# Altium footprint library Miscellaneous Devices.PcbLib: 306 footprints (part 13 of 20)
Each footprint in its own frame and in the unit in brackets; x right, y up, seen from the top. Pads: shape width x height; smd on the part's side, far side on the other; paste and mask are expansions set on the pad; w line width, h text height; cw(c..) or ccw(c..) is an arc to the next point about the centre after c.
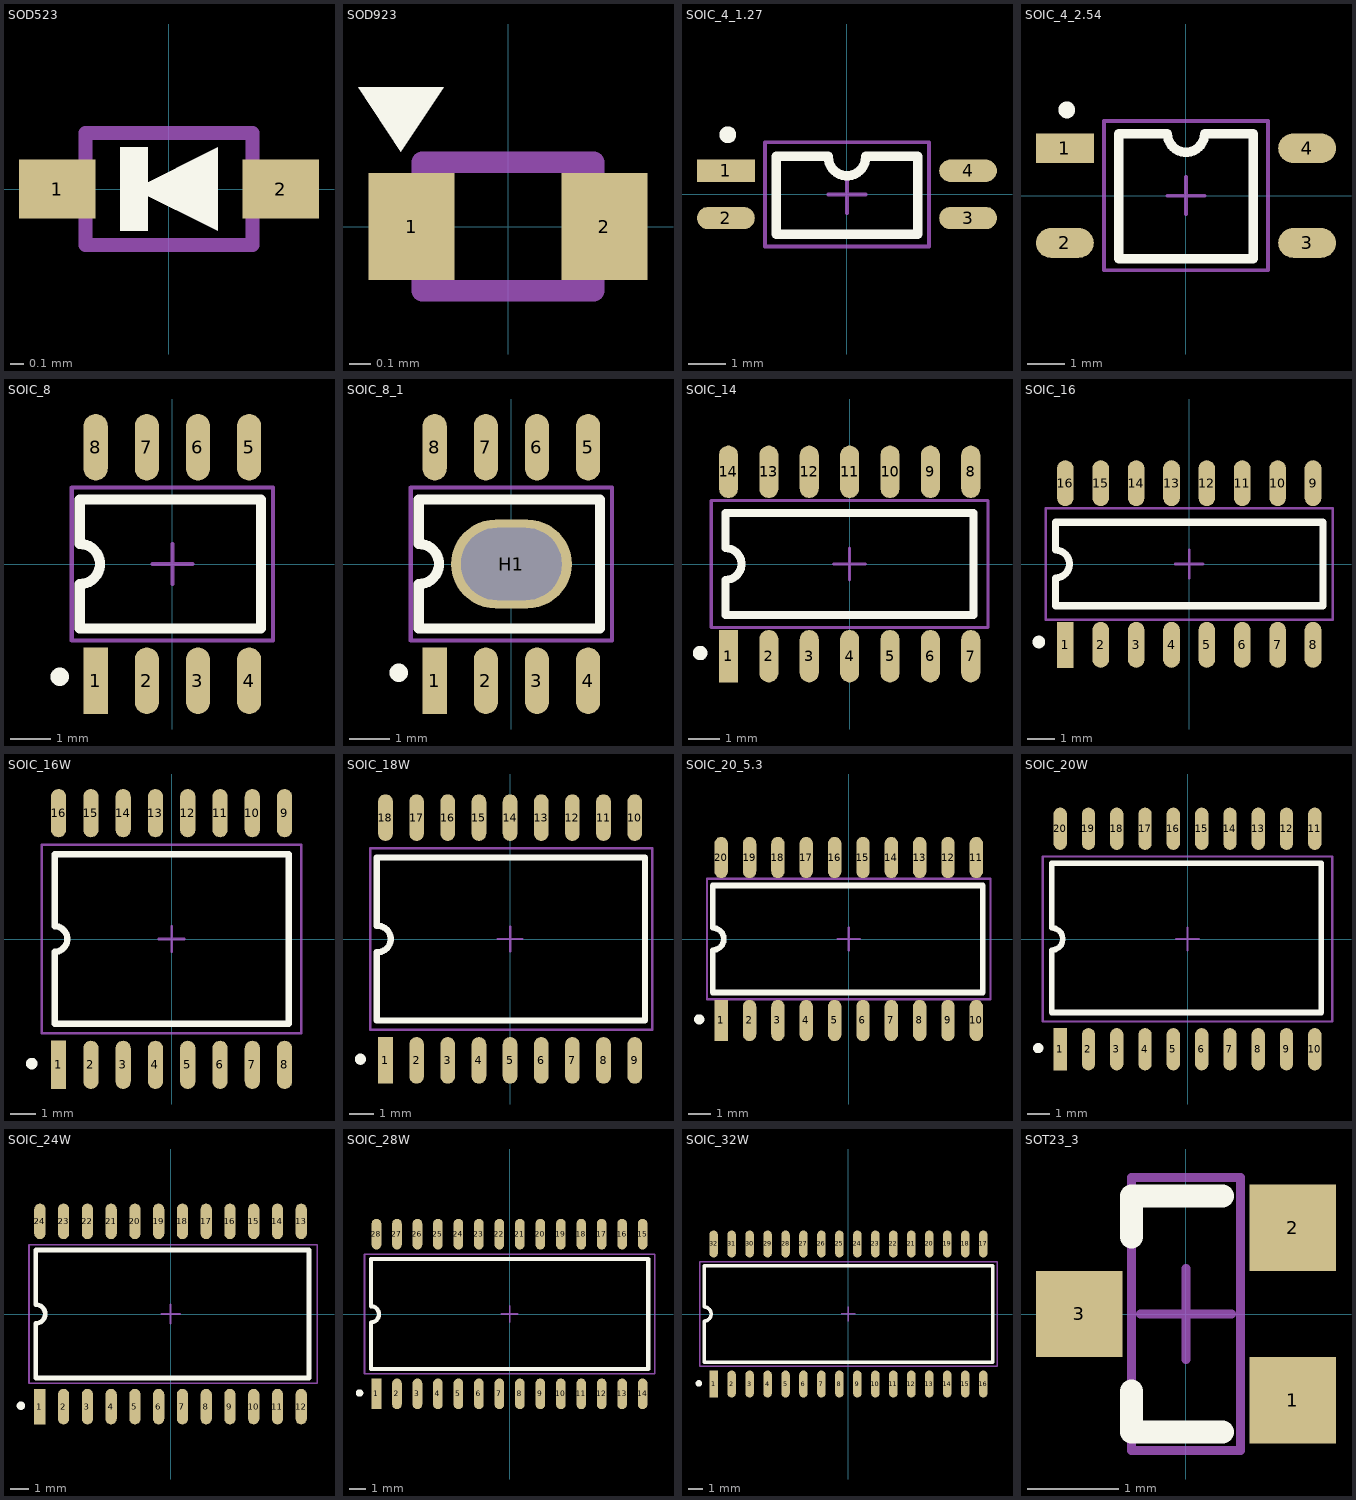
[diagram p12: the footprints below, top view; thin cyan lines are the x and y axes]

## SOD523 [mm]
pads (2):
  rect 0.55x0.42 smd: 1(-0.8,0) 2(0.8,0)
Top Overlay:
  rectangle: -0.35,-0.3 -0.15,0.3
  region: -0.25,0 0.35,-0.3 0.35,0.3
Mechanical 15:
  lines w0.1: -0.6,-0.4 0.6,-0.4 0.6,0.4 -0.6,0.4 -0.6,-0.4
3D body: height 0.7, standoff 0, extent -0.8,-0.4 0.8,0.398

## SOD923 [mm]
pads (2):
  rect 0.4x0.5 smd: 1(-0.45,0) 2(0.45,0)
Top Overlay:
  region: -0.7,0.65 -0.3,0.65 -0.5,0.35
Mechanical 15:
  lines w0.1: -0.4,-0.3 -0.4,0.3 0.4,0.3 0.4,-0.3 -0.4,-0.3
3D body: height 0.4, standoff 0, extent -0.5,-0.3 0.5,0.3

## SOIC_4_1.27 [mm]
pads (4):
  rect 1.55x0.6 smd: 1(-3.25,0.635)
  oval 1.55x0.6 smd: 2(-3.25,-0.635) 3(3.25,-0.635) 4(3.25,0.635)
Top Overlay:
  circle w0.254: c-3.2,1.6 r0.1
  lines w0.254: -0.5,1 ccw(c0,1) 0.5,1 ; -0.5,1.03 -1.9,1.03 -1.9,-1.065 1.9,-1.065 1.9,1.03 0.5,1.03
Mechanical 15:
  lines w0.1: -0.5,0 0.5,0 ; 0,-0.5 0,0.5 ; -2.2,-1.4 2.2,-1.4 2.2,1.4 -2.2,1.4 -2.2,-1.4
3D body: height 2.1, standoff 0, extent -3.5,-1.4 3.5,1.4

## SOIC_4_2.54 [mm]
pads (4):
  rect 1.55x0.8 smd: 1(-3.25,1.27)
  oval 1.55x0.8 smd: 2(-3.25,-1.27) 3(3.25,-1.27) 4(3.25,1.27)
Top Overlay:
  circle w0.254: c-3.2,2.3 r0.1
  lines w0.254: -1.8,-1.7 1.8,-1.7 1.8,1.665 0.5,1.665 cw(c0,1.665) -0.5,1.665 -1.8,1.665 -1.8,-1.7
Mechanical 15:
  lines w0.1: -0.5,0 0.5,0 ; 0,-0.5 0,0.5 ; -2.2,-2 2.2,-2 2.2,2 -2.2,2 -2.2,-2
3D body: height 2.02, standoff -0.02, extent -3.43,-2 3.43,2

## SOIC_8 [mm]
pads (8):
  rect 0.6x1.65 smd: 1(-1.905,-2.9)
  oval 0.6x1.65 smd: 2(-0.635,-2.9) 3(0.635,-2.9) 4(1.905,-2.9) 5(1.905,2.9) 6(0.635,2.9) 7(-0.635,2.9) 8(-1.905,2.9)
Top Overlay:
  circle w0.254: c-2.8,-2.8 r0.1
  lines w0.254: -2.3,-1.6 -2.3,-0.5 ccw(c-2.3,0) -2.3,0.5 -2.3,1.6 2.2,1.6 2.2,-1.6 -2.3,-1.6
Mechanical 15:
  lines w0.1: -0.5,0 0.5,0 ; 0,-0.5 0,0.5 ; -2.5,-1.9 -2.5,1.9 2.5,1.9 2.5,-1.9 -2.5,-1.9
3D body: height 1.75, standoff 0, extent -2.5,-3.006 2.5,3.006

## SOIC_8_1 [mm]
pads (9):
  rect 0.6x1.65 smd: 1(-1.905,-2.9)
  oval 0.6x1.65 smd: 2(-0.635,-2.9) 3(0.635,-2.9) 4(1.905,-2.9) 5(1.905,2.9) 6(0.635,2.9) 7(-0.635,2.9) 8(-1.905,2.9)
  oval 3x2.2 hole 1.8 slot 2.5 at 0 deg: H1(0,0)
Top Overlay:
  circle w0.254: c-2.8,-2.7 r0.1
  lines w0.254: -2.3,-1.6 2.2,-1.6 2.2,1.6 -2.3,1.6 -2.3,0.5 cw(c-2.3,0) -2.3,-0.5 -2.3,-1.6
Mechanical 15:
  lines w0.1: -2.5,-1.9 -2.5,1.9 2.5,1.9 2.5,-1.9 -2.5,-1.9
3D body: height 1.75, standoff 0, extent -2.5,-3.006 2.5,3.006

## SOIC_14 [mm]
pads (14):
  rect 0.6x1.65 smd: 1(-3.81,-2.9)
  oval 0.6x1.65 smd: 2(-2.54,-2.9) 3(-1.27,-2.9) 4(0,-2.9) 5(1.27,-2.9) 6(2.54,-2.9) 7(3.81,-2.9) 8(3.81,2.9) 9(2.54,2.9) 10(1.27,2.9) 11(0,2.9) 12(-1.27,2.9) 13(-2.54,2.9) 14(-3.81,2.9)
Top Overlay:
  circle w0.254: c-4.7,-2.8 r0.1
  lines w0.254: -3.9,-1.6 3.9,-1.6 3.9,1.6 -3.9,1.6 -3.9,0.5 cw(c-3.9,0) -3.9,-0.5 -3.9,-1.6
Mechanical 15:
  lines w0.1: -0.5,0 0.5,0 ; 0,-0.5 0,0.5 ; -4.35,-2 4.35,-2 4.35,2 -4.35,2 -4.35,-2
3D body: height 1.95, standoff 0, extent -4.35,-3.03 4.35,3.026

## SOIC_16 [mm]
pads (16):
  rect 0.6x1.65 smd: 1(-4.445,-2.9)
  oval 0.6x1.65 smd: 2(-3.175,-2.9) 3(-1.905,-2.9) 4(-0.635,-2.9) 5(0.635,-2.9) 6(1.905,-2.9) 7(3.175,-2.9) 8(4.445,-2.9) 9(4.445,2.9) 10(3.175,2.9) 11(1.905,2.9) 12(0.635,2.9) 13(-0.635,2.9) 14(-1.905,2.9) 15(-3.175,2.9) 16(-4.445,2.9)
Top Overlay:
  circle w0.254: c-5.4,-2.8 r0.1
  lines w0.254: -4.8,-1.5 4.8,-1.5 4.8,1.5 -4.8,1.5 -4.8,0.5 cw(c-4.8,0) -4.8,-0.5 -4.8,-1.5
Mechanical 15:
  lines w0.1: -0.5,0 0.5,0 ; 0,-0.5 0,0.5 ; -5.15,-2 -5.15,2 5.15,2 5.15,-2 -5.15,-2
3D body: height 1.95, standoff 0, extent -5.15,-3.03 5.15,3.026

## SOIC_16W [mm] "7.4"
pads (16):
  rect 0.6x1.9 smd: 1(-4.445,-4.95)
  oval 0.6x1.9 smd: 2(-3.175,-4.95) 3(-1.905,-4.95) 4(-0.635,-4.95) 5(0.635,-4.95) 6(1.905,-4.95) 7(3.175,-4.95) 8(4.445,-4.95) 9(4.445,4.95) 10(3.175,4.95) 11(1.905,4.95) 12(0.635,4.95) 13(-0.635,4.95) 14(-1.905,4.95) 15(-3.175,4.95) 16(-4.445,4.95)
Top Overlay:
  circle w0.254: c-5.5,-4.9 r0.1
  lines w0.254: -4.6,-3.325 -4.6,-0.5 ccw(c-4.6,0) -4.6,0.5 -4.6,3.325 4.6,3.325 4.6,-3.325 -4.6,-3.325
Mechanical 15:
  lines w0.1: -0.5,0 0.5,0 ; 0,-0.5 0,0.5 ; -5.1,-3.7 5.1,-3.7 5.1,3.7 -5.1,3.7 -5.1,-3.7
3D body: height 3.5, standoff 0, extent -5.1,-5.15 5.1,5.15

## SOIC_18W [mm] "7.4"
pads (18):
  rect 0.6x1.9 smd: 1(-5.08,-4.95)
  oval 0.6x1.9 smd: 2(-3.81,-4.95) 3(-2.54,-4.95) 4(-1.27,-4.95) 5(0,-4.95) 6(1.27,-4.95) 7(2.54,-4.95) 8(3.81,-4.95) 9(5.08,-4.95) 10(5.08,4.95) 11(3.81,4.95) 12(2.54,4.95) 13(1.27,4.95) 14(0,4.95) 15(-1.27,4.95) 16(-2.54,4.95) 17(-3.81,4.95) 18(-5.08,4.95)
Top Overlay:
  circle w0.254: c-6.1,-4.9 r0.1
  lines w0.254: -5.435,-3.325 5.5,-3.325 5.5,3.325 -5.435,3.325 -5.435,0.535 cw(c-5.4,0) -5.435,-0.535 -5.435,-3.325
Mechanical 15:
  lines w0.1: -0.5,0 0.5,0 ; 0,-0.5 0,0.5 ; -5.7,-3.7 -5.7,3.7 5.8,3.7 5.8,-3.7 -5.7,-3.7
3D body: height 2.65, standoff 0, extent -5.73,-5.15 5.8,5.15

## SOIC_20_5.3 [mm]
pads (20):
  rect 0.6x1.85 smd: 1(-5.715,-3.65)
  oval 0.6x1.85 smd: 2(-4.445,-3.65) 3(-3.175,-3.65) 4(-1.905,-3.65) 5(-0.635,-3.65) 6(0.635,-3.65) 7(1.905,-3.65) 8(3.175,-3.65) 9(4.445,-3.65) 10(5.715,-3.65) 11(5.715,3.65) 12(4.445,3.65) 13(3.175,3.65) 14(1.905,3.65) 15(0.635,3.65) 16(-0.635,3.65) 17(-1.905,3.65) 18(-3.175,3.65) 19(-4.445,3.65) 20(-5.715,3.65)
Top Overlay:
  circle w0.254: c-6.7,-3.6 r0.1
  lines w0.254: -6.1,-2.4 6,-2.4 6,2.4 -6.1,2.4 -6.1,0.5 cw(c-6.1,0) -6.1,-0.5 -6.1,-2.4
Mechanical 15:
  lines w0.1: -0.5,0 0.5,0 ; 0,-0.5 0,0.5 ; -6.35,-2.7 -6.35,2.7 6.35,2.7 6.35,-2.7 -6.35,-2.7
3D body: height 2, standoff 0, extent -6.35,-4.05 6.35,4.05

## SOIC_20W [mm] "7.4"
pads (20):
  rect 0.6x1.9 smd: 1(-5.715,-4.95)
  oval 0.6x1.9 smd: 2(-4.445,-4.95) 3(-3.175,-4.95) 4(-1.905,-4.95) 5(-0.635,-4.95) 6(0.635,-4.95) 7(1.905,-4.95) 8(3.175,-4.95) 9(4.445,-4.95) 10(5.715,-4.95) 11(5.715,4.95) 12(4.445,4.95) 13(3.175,4.95) 14(1.905,4.95) 15(0.635,4.95) 16(-0.635,4.95) 17(-1.905,4.95) 18(-3.175,4.95) 19(-4.445,4.95) 20(-5.715,4.95)
Top Overlay:
  circle w0.254: c-6.7,-4.9 r0.1
  lines w0.254: -6.1,-3.3 6,-3.3 6,3.4 -6.1,3.4 -6.1,0.5 cw(c-6.1,0) -6.1,-0.5 -6.1,-3.3
Mechanical 15:
  lines w0.1: -0.5,0 0.5,0 ; 0,-0.5 0,0.5 ; -6.5,-3.7 -6.5,3.7 6.5,3.7 6.5,-3.7 -6.5,-3.7
3D body: height 2.8, standoff 0, extent -6.518,-5.152 6.482,5.184

## SOIC_24W [mm] "7.4"
pads (24):
  rect 0.6x1.9 smd: 1(-6.985,-4.95)
  oval 0.6x1.9 smd: 2(-5.715,-4.95) 3(-4.445,-4.95) 4(-3.175,-4.95) 5(-1.905,-4.95) 6(-0.635,-4.95) 7(0.635,-4.95) 8(1.905,-4.95) 9(3.175,-4.95) 10(4.445,-4.95) 11(5.715,-4.95) 12(6.985,-4.95) 13(6.985,4.95) 14(5.715,4.95) 15(4.445,4.95) 16(3.175,4.95) 17(1.905,4.95) 18(0.635,4.95) 19(-0.635,4.95) 20(-1.905,4.95) 21(-3.175,4.95) 22(-4.445,4.95) 23(-5.715,4.95) 24(-6.985,4.95)
Top Overlay:
  circle w0.254: c-8,-4.9 r0.1
  lines w0.254: -7.2,-3.425 -7.2,-0.5 ccw(c-7.2,0) -7.2,0.5 -7.2,3.425 7.4,3.425 7.4,-3.425 -7.2,-3.425
Mechanical 15:
  lines w0.1: -0.5,0 0.5,0 ; 0,-0.5 0,0.5 ; -7.56,-3.7 -7.56,3.7 7.84,3.7 7.84,-3.7 -7.56,-3.7
3D body: height 2.6, standoff 0, extent -7.56,-5.2 7.84,5.2

## SOIC_28W [mm] "7.4"
pads (28):
  rect 0.6x1.9 smd: 1(-8.255,-4.95)
  oval 0.6x1.9 smd: 2(-6.985,-4.95) 3(-5.715,-4.95) 4(-4.445,-4.95) 5(-3.175,-4.95) 6(-1.905,-4.95) 7(-0.635,-4.95) 8(0.635,-4.95) 9(1.905,-4.95) 10(3.175,-4.95) 11(4.445,-4.95) 12(5.715,-4.95) 13(6.985,-4.95) 14(8.255,-4.95) 15(8.255,4.95) 16(6.985,4.95) 17(5.715,4.95) 18(4.445,4.95) 19(3.175,4.95) 20(1.905,4.95) 21(0.635,4.95) 22(-0.635,4.95) 23(-1.905,4.95) 24(-3.175,4.95) 25(-4.445,4.95) 26(-5.715,4.95) 27(-6.985,4.95) 28(-8.255,4.95)
Top Overlay:
  circle w0.254: c-9.3,-4.9 r0.1
  lines w0.254: -8.6,0.483 cw(c-8.6,-0.018) -8.6,-0.518 -8.6,-3.4 8.6,-3.4 8.6,3.4 -8.6,3.4 -8.6,0.5
Mechanical 15:
  lines w0.1: -0.5,0 0.5,0 ; 0,-0.5 0,0.5 ; -9,-3.7 -9,3.7 9,3.7 9,-3.7 -9,-3.7
3D body: height 2.65, standoff 0, extent -8.95,-5.15 8.95,5.15

## SOIC_32W [mm] "7.4"
pads (32):
  rect 0.6x1.9 smd: 1(-9.525,-4.95)
  oval 0.6x1.9 smd: 2(-8.255,-4.95) 3(-6.985,-4.95) 4(-5.715,-4.95) 5(-4.445,-4.95) 6(-3.175,-4.95) 7(-1.905,-4.95) 8(-0.635,-4.95) 9(0.635,-4.95) 10(1.905,-4.95) 11(3.175,-4.95) 12(4.445,-4.95) 13(5.715,-4.95) 14(6.985,-4.95) 15(8.255,-4.95) 16(9.525,-4.95) 17(9.525,4.95) 18(8.255,4.95) 19(6.985,4.95) 20(5.715,4.95) 21(4.445,4.95) 22(3.175,4.95) 23(1.905,4.95) 24(0.635,4.95) 25(-0.635,4.95) 26(-1.905,4.95) 27(-3.175,4.95) 28(-4.445,4.95) 29(-5.715,4.95) 30(-6.985,4.95) 31(-8.255,4.95) 32(-9.525,4.95)
Top Overlay:
  circle w0.254: c-10.57,-4.9 r0.1
  lines w0.254: -10.2,-3.4 10.2,-3.4 10.2,3.4 -10.2,3.4 -10.2,0.5 cw(c-10.2,0) -10.2,-0.501 -10.2,-3.4
Mechanical 15:
  lines w0.1: -0.5,0 0.5,0 ; 0,-0.5 0,0.5 ; -10.5,-3.7 10.5,-3.7 10.5,3.7 -10.5,3.7 -10.5,-3.7

## SOT23_3 [mm]
pads (3):
  rect 0.95x0.95 smd: 1(1.175,-0.95) 2(1.175,0.95) 3(-1.175,0)
Top Overlay:
  lines w0.254: -0.6,-0.85 -0.6,-1.3 0.4,-1.3 ; -0.6,0.85 -0.6,1.3 0.4,1.3
Mechanical 15:
  lines w0.1: -0.5,0 0.5,0 ; 0,-0.5 0,0.5 ; -0.6,-1.5 0.6,-1.5 0.6,1.5 -0.6,1.5 -0.6,-1.5
3D body: height 1.08, standoff 0, extent -1.34,-1.5 1.3,1.5